# Altium footprint library Capacitors.PcbLib: 1 footprints
Each footprint in its own frame and in the unit in brackets; x right, y up, seen from the top. Pads: shape width x height; smd on the part's side, far side on the other; paste and mask are expansions set on the pad; w line width, h text height; cw(c..) or ccw(c..) is an arc to the next point about the centre after c.
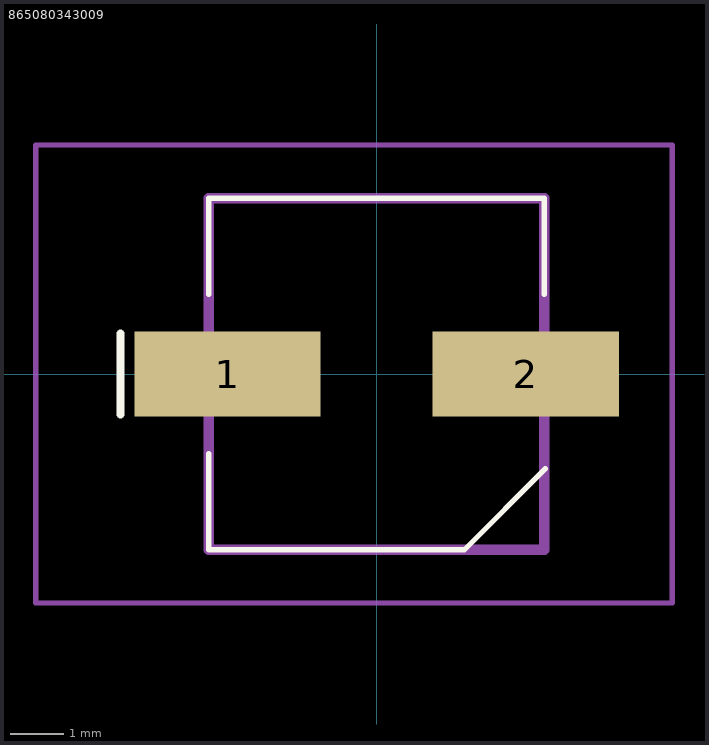
[diagram p0: the footprint, top view; thin cyan lines are the x and y axes]

## 865080343009 [mm] "Width: 6.6 mm, Height: 5.5mm"
pads (2):
  rect 3.5x1.6 smd mask+0.035: 1(-2.8,0) 2(2.8,0)
Top Overlay:
  lines w0.1: -3.15,-1.5 -3.15,-3.3 1.137,-3.3 ; -3.15,1.5 -3.15,3.3 3.15,3.3 3.15,1.5 ; 1.137,-3.302 1.645,-3.302 3.169,-1.778
  lines w0.15: -4.808,-0.762 -4.808,0.762
Mechanical 13:
  lines w0.2: -3.15,-3.3 -3.15,3.3 3.15,3.3 3.15,-3.3 -3.15,-3.3
Mechanical 15:
  lines w0.1: -6.4,-4.3 -6.4,4.3 5.55,4.3 5.55,-4.3 -6.4,-4.3
3D body "865080343009.stp": height 5.5, standoff 0, extent -3.632,-3.3 3.668,3.3